# Altium footprint library EGS002.PcbLib: 1 footprints
Each footprint in its own frame and in the unit in brackets; x right, y up, seen from the top. Pads: shape width x height; smd on the part's side, far side on the other; paste and mask are expansions set on the pad; w line width, h text height; cw(c..) or ccw(c..) is an arc to the next point about the centre after c.
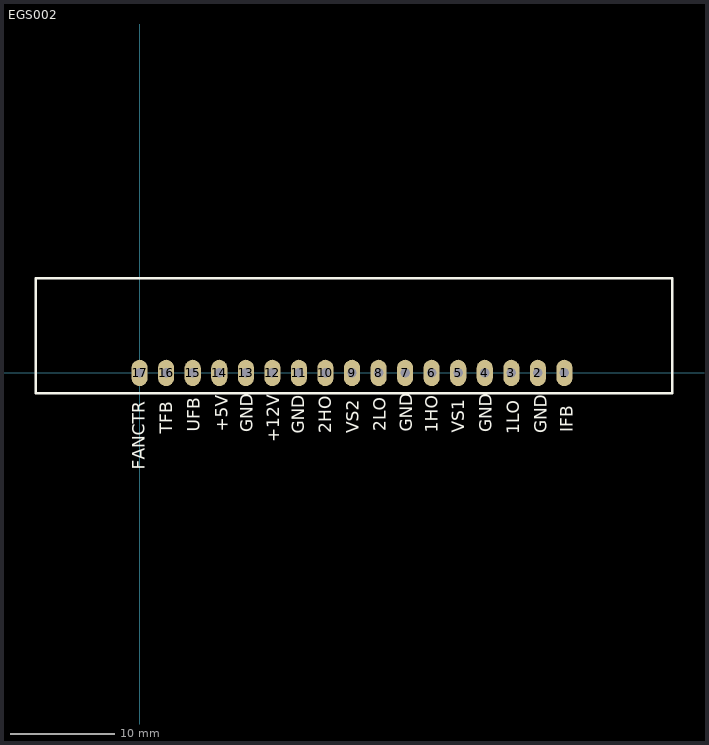
[diagram p0: the footprint, top view; thin cyan lines are the x and y axes]

## EGS002 [mm]
pads (17):
  oval 1.54x2.524 hole 0.9: 1(40.64,0) 2(38.1,0) 3(35.56,0) 4(33.02,0) 5(30.48,0) 6(27.94,0) 7(25.4,0) 8(22.86,0) 9(20.32,0) 10(17.78,0) 11(15.24,0) 12(12.7,0) 13(10.16,0) 14(7.62,0) 15(5.08,0) 16(2.54,0) 17(0,0)
Top Overlay:
  lines w0.254: -9.931,-1.956 50.952,-1.956 50.952,9.068 -9.931,9.068 -9.931,-1.956
  text "FANCTR" at 0.483,-9.271 h1.2
  text "TFB" at 3.124,-5.817 h1.2
  text "UFB" at 5.766,-5.639 h1.2
  text "+5V" at 8.433,-5.639 h1.2
  text "GND" at 10.82,-5.69 h1.2
  text "+12V" at 13.36,-6.655 h1.2
  text "GND" at 15.748,-5.817 h1.2
  text "2HO" at 18.313,-5.766 h1.2
  text "VS2" at 20.955,-5.766 h1.2
  text "2LO" at 23.546,-5.588 h1.2
  text "GND" at 26.086,-5.639 h1.2
  text "1HO" at 28.524,-5.74 h1.2
  text "VS1" at 31.039,-5.74 h1.2
  text "GND" at 33.68,-5.69 h1.2
  text "1LO" at 36.322,-5.867 h1.2
  text "GND" at 38.938,-5.791 h1.2
  text "IFB" at 41.427,-5.69 h1.2
3D body "EGS002.STEP": height 36.7, standoff -0.18, extent -10.008,-0.294 50.992,9.096